# Altium footprint library Power_vac.PcbLib: 50 footprints (part 1 of 4)
Each footprint in its own frame and in the unit in brackets; x right, y up, seen from the top. Pads: shape width x height; smd on the part's side, far side on the other; paste and mask are expansions set on the pad; w line width, h text height; cw(c..) or ccw(c..) is an arc to the next point about the centre after c.
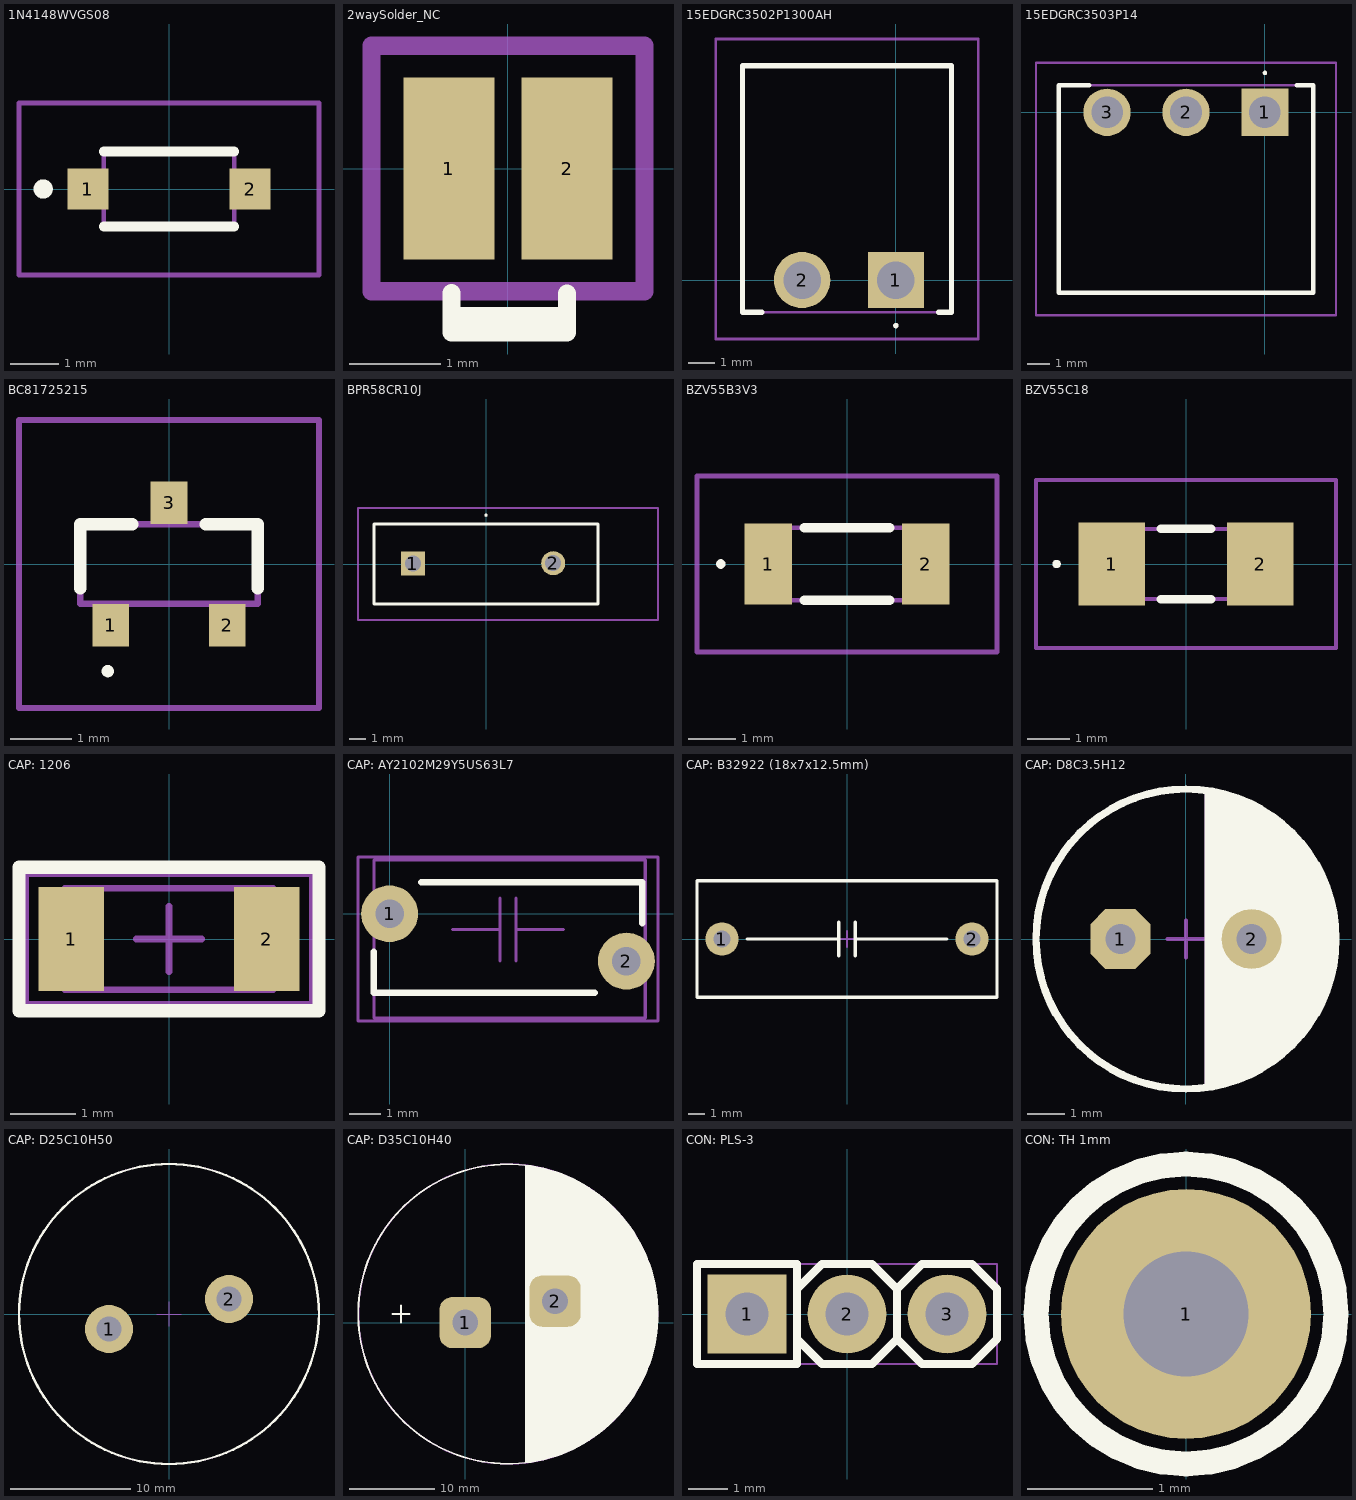
[diagram p0: the footprints below, top view; thin cyan lines are the x and y axes]

## 1N4148WVGS08 [mm]
pads (2):
  rect 0.85x0.85 smd: 1(-1.675,0) 2(1.675,0)
Top Overlay:
  lines w0.2: -1.35,-0.775 1.35,-0.775 ; -1.35,0.775 1.35,0.775 ; -2.6,-0.1 ccw(c-2.6,0) -2.6,0.1 ccw(c-2.6,0) -2.6,-0.1
Mechanical 13:
  lines w0.1: -1.35,-0.775 -1.35,0.775 1.35,0.775 1.35,-0.775 -1.35,-0.775
Mechanical 15:
  lines w0.1: -3.1,-1.775 -3.1,1.775 3.1,1.775 3.1,-1.775 -3.1,-1.775
3D body "1N4148W-V-GS08.stp": height 1.26, standoff 0, extent -1.854,-0.775 1.854,0.775

## 2waySolder_NC [mm] "2 way net solder junction - Normally Connected"
height 0.025
pads (2):
  rect 1x2 smd paste-2.032: 1(-0.65,0) 2(0.65,0)
Top Overlay:
  lines w0.2: -0.62,-1.37 -0.62,-1.624 ; 0.65,-1.8 0.05,-1.8 -0.62,-1.8 -0.62,-1.624 ; 0.65,-1.776 0.65,-1.6 0.65,-1.376 ; 0.65,-1.624 -0.62,-1.624
Top Paste:
  rectangle: -1.067,-0.914 1.067,0.914
Top Solder:
  rectangle: -1.35,-1.2 1.35,1.2
Mechanical 6:
  text ".designator" at -1.1,-0.5 h0.9
Mechanical 8:
  lines w0.2: -1.5,-1.35 -1.5,1.35 1.5,1.35 1.5,-1.35 -1.5,-1.35
Mechanical 15:
  lines w0.2: -1.5,1.35 -1.5,-1.35 1.5,-1.35 1.5,-1.3 1.5,1.35 -1.45,1.35
3D body: height 0.8, standoff -0.2, extent -0.5,-1.15 0.5,-0.15
3D body: height 0.8, standoff -0.2, extent -0.503,-0.652 0.497,0.348
3D body: height 0.8, standoff -0.2, extent -0.503,-0.302 0.497,0.698
3D body: height 0.8, standoff -0.2, extent -0.503,0.152 0.497,1.152

## 15EDGRC3502P1300AH [mm]
pads (2):
  rect 2.1x2.1 hole 1.4: 1(0,0)
  round 2.1 hole 1.4: 2(-3.5,0)
Top Overlay:
  lines w0.1: 0,-1.75 cw(c0,-1.7) 0,-1.65 cw(c0,-1.7) 0,-1.75
  lines w0.2: -5,-1.2 -5.725,-1.2 -5.725,8 2.075,8 2.075,-1.2 1.6,-1.2
Mechanical 13:
  lines w0.1: -5.725,-1.2 2.075,-1.2 2.075,8 -5.725,8 -5.725,-1.2
Mechanical 15:
  lines w0.1: -6.725,-2.2 3.075,-2.2 3.075,9 -6.725,9 -6.725,-2.2
3D body "15EDGRC-3.5-02P-13-00AH.stp": height 7.25, standoff -3.39, extent -5.72,-1.2 2.08,8

## 15EDGRC3503P14 [mm]
pads (3):
  rect 2.1x2.1 hole 1.4: 1(0,0)
  round 2.1 hole 1.4: 2(-3.5,0) 3(-7,0)
Top Overlay:
  lines w0.1: 0,1.7 ccw(c0,1.75) 0,1.8 ccw(c0,1.75) 0,1.7
  lines w0.2: -7.8,1.2 -9.15,1.2 -9.15,-8 2.15,-8 2.15,1.2 1.4,1.2
Mechanical 13:
  lines w0.1: -9.15,-8 -9.15,1.2 2.15,1.2 2.15,-8 -9.15,-8
Mechanical 15:
  lines w0.1: -10.15,-9 3.15,-9 3.15,2.2 -10.15,2.2 -10.15,-9
3D body "15EDGRC-3.5-03P-14.stp": height 7.4, standoff -3.24, extent -9.15,-8 2.15,1.2

## BC81725215 [mm]
pads (3):
  rect 0.6x0.7 smd: 1(-0.95,-1) 2(0.95,-1) 3(0,1)
Top Overlay:
  lines w0.1: -1,-1.8 ccw(c-1,-1.75) -1,-1.7 ccw(c-1,-1.75) -1,-1.8
  lines w0.2: -1.45,-0.4 -1.45,0.65 -0.6,0.65 ; 0.6,0.65 1.45,0.65 1.45,-0.4
Mechanical 13:
  lines w0.1: -1.45,-0.65 1.45,-0.65 1.45,0.65 -1.45,0.65 -1.45,-0.65
Mechanical 15:
  lines w0.1: -2.45,-2.35 2.45,-2.35 2.45,2.35 -2.45,2.35 -2.45,-2.35
3D body "BC817-25,215.stp": height 0.95, standoff 0, extent -1.452,-1.201 1.448,1.199

## BPR58CR10J [mm]
pads (2):
  rect 1.5x1.5 hole 1: 1(-4.575,0.025)
  round 1.5 hole 1: 2(4.2,0.05)
Top Overlay:
  lines w0.1: 0,3 ccw(c0,3.05) 0,3.1 ccw(c0,3.05) 0,3
  lines w0.2: -7,-2.5 -7,2.5 7,2.5 7,-2.5 -7,-2.5
Mechanical 13:
  lines w0.1: -7,-2.5 -7,2.5 7,2.5 7,-2.5 -7,-2.5
Mechanical 15:
  lines w0.1: -8,-3.5 -8,3.5 10.75,3.5 10.75,-3.5 -8,-3.5
3D body "BPR58CR10J.stp": height 18.22, standoff -12.78, extent -7,-2.5 7,2.5

## BZV55B3V3 [mm]
pads (2):
  rect 1x1.7 smd: 1(-1.65,0) 2(1.65,0)
Top Overlay:
  lines w0.1: -2.7,0 ccw(c-2.65,0) -2.6,0 ccw(c-2.65,0) -2.7,0
  lines w0.2: -0.9,-0.762 0.9,-0.762 ; -0.9,0.763 0.9,0.763
Mechanical 13:
  lines w0.1: -1.75,-0.762 1.75,-0.762 1.75,0.763 -1.75,0.763 -1.75,-0.762
Mechanical 15:
  lines w0.1: -3.15,-1.85 3.15,-1.85 3.15,1.85 -3.15,1.85 -3.15,-1.85

## BZV55C18 [mm]
pads (2):
  rect 1.57x1.96 smd: 1(-1.75,0) 2(1.75,0)
Top Overlay:
  lines w0.1: -3.1,0 cw(c-3.05,0) -3,0 cw(c-3.05,0) -3.1,0
  lines w0.2: -0.6,-0.825 0.6,-0.825 ; -0.6,0.825 0.6,0.825
Mechanical 13:
  lines w0.1: -1.75,-0.825 1.75,-0.825 1.75,0.825 -1.75,0.825 -1.75,-0.825
Mechanical 15:
  lines w0.1: -3.535,-1.98 3.535,-1.98 3.535,1.98 -3.535,1.98 -3.535,-1.98
3D body "BZV55C18.stp": height 1.6, standoff 0, extent -1.75,-0.794 1.75,0.794

## CAP: 1206 [mm]
height 0.6
pads (2):
  rect 1x1.6 smd: 1(-1.5,0) 2(1.5,0)
Top Overlay:
  lines w0.2: -2.3,-1.1 2.3,-1.1 2.3,1.1 -2.3,1.1 -2.3,-1.1
Mechanical 1:
  lines w0.1: -1.6,-0.775 1.6,-0.775 1.6,0.775 -1.6,0.775 -1.6,-0.775
Mechanical 15:
  lines w0.1: -0.5,0 0.5,0 ; 0,-0.5 0,0.5 ; -2.2,-1 -2.2,1 2.2,1 2.2,-1 -2.2,-1
3D body "SW3dPS-1206 SMD Capacitor.STEP": height 1, standoff 0, extent -1.6,-0.8 1.6,0.8

## CAP: AY2102M29Y5US63L7 [mm]
pads (2):
  round 1.8 hole 0.9: 1(0,0) 2(7.5,-1.5)
Top Overlay:
  lines w0.2: -0.497,-1.2 -0.497,-2.5 6.5,-2.5 ; 1,1 7.997,1 7.997,-0.3
Mechanical 1:
  lines w0.1: 2,-0.5 3.5,-0.5 ; 3.5,-1.5 3.5,0.5 ; 4,-1.5 4,0.5 ; 4,-0.5 5.5,-0.5 ; -0.497,-3.3 -0.497,1.7 8.097,1.7 8.097,-3.3 -0.497,-3.3
Mechanical 15:
  lines w0.1: -1,-3.4 -1,1.8 8.5,1.8 8.5,-3.4 -1,-3.4
3D body "6666.STEP": height 10.75, standoff -1.75, extent -0.5,-3.3 8.1,1.7

## CAP: B32922 (18x7x12.5mm) [mm]
pads (2):
  round 2 hole 1 mask+0.075: 1(-7.5,0) 2(7.5,0)
Top Overlay:
  lines w0.2: -6,0 -0.5,0 ; -0.5,-1 -0.5,1 ; 0.5,-1 0.5,1 ; 0.5,0 6,0 ; -9,-3.5 -9,3.5 9,3.5 9,-3.5 -9,-3.5
Mechanical 1:
  lines w0.1: -6,0 -0.5,0 ; -0.5,-1 -0.5,1 ; 0.5,-1 0.5,1 ; 0.5,0 6,0 ; -9,-3.5 9,-3.5 9,3.5 -9,3.5 -9,-3.5
Mechanical 15:
  lines w0.1: -0.5,0 0.5,0 ; 0,-0.5 0,0.5 ; -9,-3.5 9,-3.5 9,3.5 -9,3.5 -9,-3.5
3D body "6666.STEP": height 12.5, standoff -4, extent -9,-3.5 9,3.5

## CAP: D8C3.5H12 [mm]
height 12
pads (2):
  oct 1.6x1.6 hole 0.8: 1(-1.75,0)
  round 1.6 hole 0.8: 2(1.75,0)
Top Overlay:
  circle w0.2: c0,0 r4
  region: 0.5,-4 0.5,4 1.3,3.8 2.05,3.45 2.625,3 3.125,2.5 3.575,1.775 3.85,1.1 4,0.325 3.975,-0.425 3.85,-1.125 3.55,-1.85 3.2,-2.4 2.7,-2.95 2.125,-3.375 1.225,-3.8
Mechanical 1:
  circle w0.1: c0,0 r4
  region: 0.5,-4 0.5,4 1.3,3.8 2.05,3.45 2.625,3 3.125,2.5 3.575,1.775 3.85,1.1 4,0.325 3.975,-0.425 3.85,-1.125 3.55,-1.85 3.2,-2.4 2.7,-2.95 2.125,-3.375 1.225,-3.8
Mechanical 15:
  circle w0.1: c0,0 r4
  lines w0.1: -0.5,0 0.5,0 ; 0,-0.5 0,0.5
3D body "User Library-CapAluRadial_D80H115.STEP": height 13, standoff -3, extent -4.25,-4.247 4.25,4.247

## CAP: D25C10H50 [mm]
height 37
pads (2):
  round 4 hole 2.1: 1(-5,-1.25) 2(5,1.25)
Top Overlay:
  circle w0.2: c0,0 r12.5
Mechanical 1:
  circle w0.1: c0,0 r12.5
Mechanical 15:
  circle w0.1: c0,0 r12.5
  lines w0.1: -1,0 1,0 ; 0,-1 0,1
3D body "User Library-Cap 25x50.STEP": height 50, standoff 0, extent -12.5,-12.5 12.5,12.5

## CAP: D35C10H40 [mm]
height 50
pads (2):
  rrect50% 6x6 hole 3: 1(0,0) 2(10.5,2.5)
Top Overlay:
  circle w0.2: c5,1 r17.5
  region: 7,18.3 7.525,18.3 8.625,18.075 10,17.75 11.25,17.3 12.625,16.725 13.875,16.05 15.225,15.175 16.2,14.45 17.35,13.35 18.45,12.15 19.25,11.125 19.7,10.425 20.425,9.2 20.925,8.15 21.375,7.075 21.875,5.525 22.125,4.375 22.375,2.675 22.45,1.25 22.425,-0.025 22.325,-1.15 22.175,-2.2 21.725,-4.1 21.4,-5.025 20.525,-7.025 19.275,-9.05 18.4,-10.2 17.125,-11.55 15.65,-12.85 13.756,-14.143 11.88,-15.09 10.8,-15.45 9.025,-16.025 7.5,-16.3 7,-16.35
  lines w0.2: -8.5,1 -6.5,1 ; -7.5,0 -7.5,2
Mechanical 1:
  circle w0.1: c5,1 r17.464
  region: 7,18.3 7.525,18.3 8.625,18.075 10,17.75 11.25,17.3 12.625,16.725 13.875,16.05 15.225,15.175 16.2,14.45 17.35,13.35 18.45,12.15 19.25,11.125 19.7,10.425 20.425,9.2 20.925,8.15 21.375,7.075 21.875,5.525 22.125,4.375 22.375,2.675 22.45,1.25 22.425,-0.025 22.325,-1.15 22.175,-2.2 21.725,-4.1 21.4,-5.025 20.525,-7.025 19.275,-9.05 18.4,-10.2 17.125,-11.55 15.65,-12.85 13.756,-14.143 11.88,-15.09 10.8,-15.45 9.025,-16.025 7.5,-16.3 7,-16.35
  lines w0.1: -8.5,1 -6.5,1 ; -7.5,0 -7.5,2
Mechanical 15:
  circle w0.1: c5,1 r17.529
3D body "Capacitor D35H40.STEP": height 40, standoff 0, extent -13,-17 23,19

## CON: PLS-3 [mm]
height 10
pads (3):
  rect 2x2 hole 1.1: 1(-2.54,0)
  round 2 hole 1.1: 2(0,0) 3(2.54,0)
Top Overlay:
  lines w0.2: -1.27,-0.635 -0.635,-1.27 0.635,-1.27 1.27,-0.635 ; -1.27,0.635 -0.635,1.27 0.635,1.27 1.27,0.635 ; 1.27,-0.635 1.905,-1.27 3.175,-1.27 3.81,-0.635 3.81,0.635 3.175,1.27 1.905,1.27 1.27,0.635 ; 1.27,-0.635 1.27,0.635 ; -3.81,-1.27 -1.27,-1.27 -1.27,1.27 -3.81,1.27 -3.81,-1.27
Mechanical 1:
  lines w0.1: -1.27,-0.635 -0.635,-1.27 0.635,-1.27 1.27,-0.635 ; -1.27,0.635 -0.635,1.27 0.635,1.27 1.27,0.635 ; 1.27,-0.635 1.27,0.635 ; 1.27,-0.635 1.905,-1.27 3.175,-1.27 3.81,-0.635 3.81,0.635 3.175,1.27 1.905,1.27 1.27,0.635 ; -3.81,-1.27 -3.81,1.27 -1.27,1.27 -1.27,-1.27 -3.81,-1.27
Mechanical 15:
  lines w0.05: -3.81,-1.27 -3.81,1.27 3.81,1.27 3.81,-1.27 -3.81,-1.27
  lines w0.1: -0.5,0 0.5,0 ; 0,-0.5 0,0.5
3D body "PLS-3.STEP": height 8.54, standoff -3, extent -3.81,-1.27 3.81,1.27

## CON: TH 1mm [mm]
pads (1):
  round 2 hole 1 mask+0.075: 1(0,0)
Top Overlay:
  circle w0.2: c0,0 r1.2
Mechanical 15:
  circle w0.1: c0,0 r1.2
  lines w0.1: -0.5,0 0.5,0 ; 0,-0.5 0,0.5